# Altium footprint library Eth_Local.PcbLib: 10 footprints
Each footprint in its own frame and in the unit in brackets; x right, y up, seen from the top. Pads: shape width x height; smd on the part's side, far side on the other; paste and mask are expansions set on the pad; w line width, h text height; cw(c..) or ccw(c..) is an arc to the next point about the centre after c.
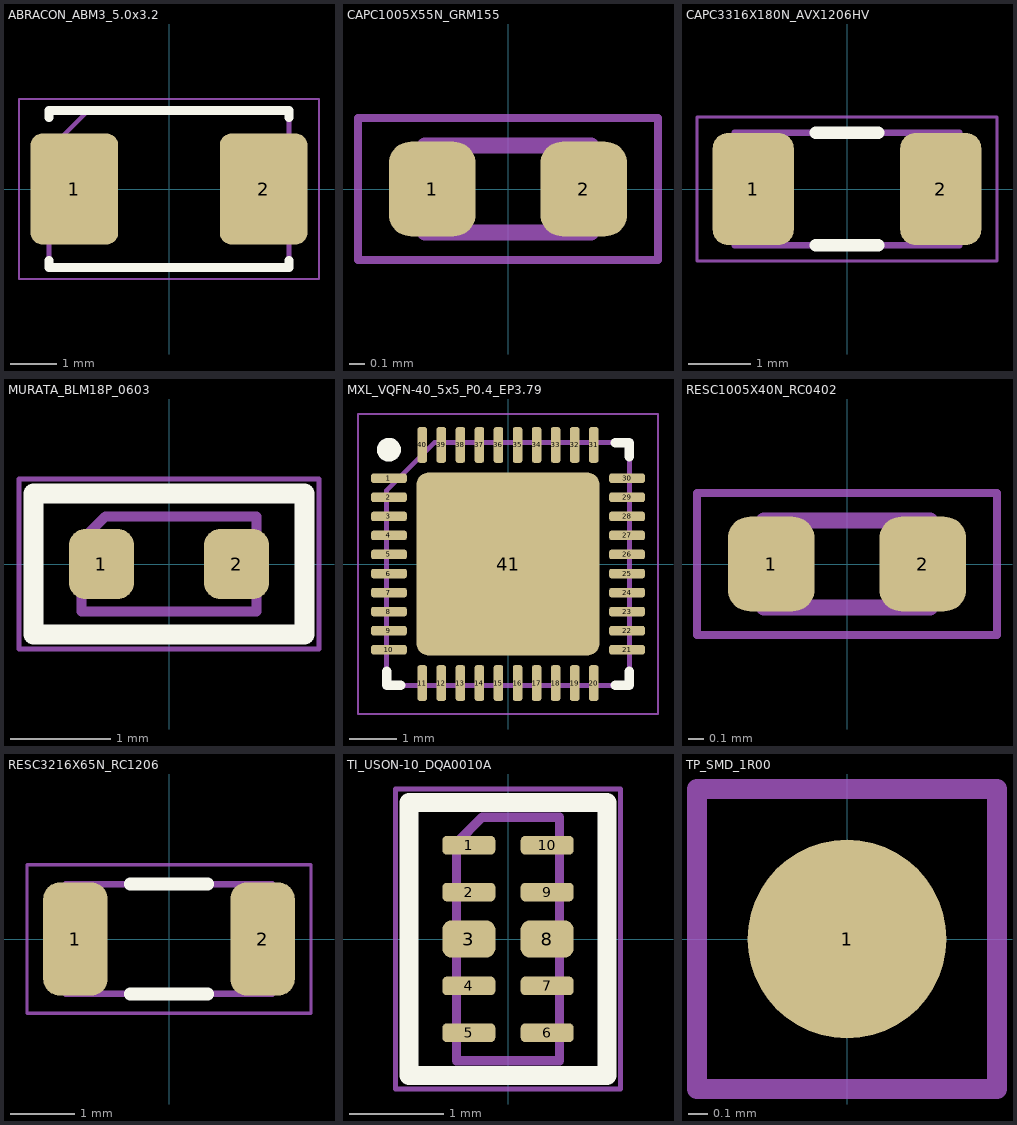
[diagram p0: the footprints below, top view; thin cyan lines are the x and y axes]

## ABRACON_ABM3_5.0x3.2 [mm] "Custom, 2 pads; custom lands, density N (nominal); from Abracon ABM3, 04-25-22, p. 3; Abracon ABM3 5.0x3.2 crystal, vendor land pattern (rev 04-25-22 p.3)"
height 1.3
pads (2):
  rrect26% 1.9x2.4 smd: 1(-2.05,0) 2(2.05,0)
Top Overlay:
  lines w0.2: -2.6,-1.55 -2.6,-1.7 2.6,-1.7 2.6,-1.55 ; -2.6,1.55 -2.6,1.7 2.6,1.7 2.6,1.55
Mechanical 13:
  lines w0.1: -2.6,-1.7 2.6,-1.7 2.6,1.7 -1.75,1.7 -2.6,0.85 -2.6,-1.7
  text ".Designator" at -2.34,-0.23 h0.46
Mechanical 15:
  lines w0.05: -3.25,-1.95 3.25,-1.95 3.25,1.95 -3.25,1.95 -3.25,-1.95

## CAPC1005X55N_GRM155 [mm] "Chip, 2 pads; IPC-7351B land pattern, density N (nominal); from Murata GRM1555C1H300JA01 data sheet, 2016/07/19, no land pattern in this datasheet; IPC-7351B, p. 1; Murata GRM155 0402 MLCC, IPC-7351B N"
height 0.55
pads (2):
  rrect50% 0.55x0.6 smd: 1(-0.48,0) 2(0.48,0)
Mechanical 13:
  lines w0.1: -0.525,-0.275 -0.525,0.275 0.525,0.275 0.525,-0.275 -0.525,-0.275
  text ".Designator" at -1.522,-0.15 h0.3
Mechanical 15:
  lines w0.05: -0.95,-0.45 -0.95,0.45 0.95,0.45 0.95,-0.45 -0.95,-0.45

## CAPC3316X180N_AVX1206HV [mm] "Chip, 2 pads; IPC-7351B land pattern, density N (nominal); from KYOCERA AVX High Voltage MLC Chips, 072022, no land pattern in this datasheet; IPC-7351B, p. 97; KYOCERA AVX 1206 high-voltage MLCC (2kV), IPC-7351B N"
height 1.8
pads (2):
  rrect38% 1.3x1.8 smd: 1(-1.5,0) 2(1.5,0)
Top Overlay:
  lines w0.2: -0.5,-0.9 0.5,-0.9 ; -0.5,0.9 0.5,0.9
Mechanical 13:
  lines w0.1: -1.8,-0.9 -1.8,0.9 1.8,0.9 1.8,-0.9 -1.8,-0.9
  text ".Designator" at -1.619,-0.159 h0.32
Mechanical 15:
  lines w0.05: -2.4,-1.15 -2.4,1.15 2.4,1.15 2.4,-1.15 -2.4,-1.15

## MURATA_BLM18P_0603 [mm] "Custom, 2 pads; custom lands, density N (nominal); from Murata BLM18 N-series reference specification JENF243A_0003AL-01, 01, p. 9; Murata BLM18P ferrite 0603, vendor reflow land (spec JENF243A p.9)"
height 0.95
pads (2):
  rrect50% 0.65x0.7 smd: 1(-0.675,0) 2(0.675,0)
Top Overlay:
  lines w0.2: -1.355,-0.705 -1.355,0.705 1.355,0.705 1.355,-0.705 -1.355,-0.705
Mechanical 13:
  lines w0.1: -0.875,-0.475 -0.875,0.238 -0.637,0.475 0.875,0.475 0.875,-0.475 -0.875,-0.475
  text ".Designator" at -1.522,-0.15 h0.3
Mechanical 15:
  lines w0.05: -1.5,-0.85 -1.5,0.85 1.5,0.85 1.5,-0.85 -1.5,-0.85

## MXL_VQFN-40_5x5_P0.4_EP3.79 [mm] "Quad flat no-lead, 41 pads, 0.4 mm pitch; IPC-7351B land pattern, density N (nominal); from MaxLinear MxL86211C Data Sheet, 1.3 (2025-05-05), 621151; no land pattern for this package (IPC-7351B from Fig.23), p. 174; MxL86211C PG-VQFN-40 5x5 0.4 pitch, EP 3.79 (DS Rev1.3 Fig.23 p.174), IPC-7351B"
height 0.9
pads (41):
  rrect50% 0.75x0.2 smd: 1(-2.5,1.8) 2(-2.5,1.4) 3(-2.5,1) 4(-2.5,0.6) 5(-2.5,0.2) 6(-2.5,-0.2) 7(-2.5,-0.6) 8(-2.5,-1) 9(-2.5,-1.4) 10(-2.5,-1.8) 21(2.5,-1.8) 22(2.5,-1.4) 23(2.5,-1) 24(2.5,-0.6) 25(2.5,-0.2) 26(2.5,0.2) 27(2.5,0.6) 28(2.5,1) 29(2.5,1.4) 30(2.5,1.8)
  rrect50% 0.2x0.75 smd: 11(-1.8,-2.5) 12(-1.4,-2.5) 13(-1,-2.5) 14(-0.6,-2.5) 15(-0.2,-2.5) 16(0.2,-2.5) 17(0.6,-2.5) 18(1,-2.5) 19(1.4,-2.5) 20(1.8,-2.5) 31(1.8,2.5) 32(1.4,2.5) 33(1,2.5) 34(0.6,2.5) 35(0.2,2.5) 36(-0.2,2.5) 37(-0.6,2.5) 38(-1,2.5) 39(-1.4,2.5) 40(-1.8,2.5)
  rrect13% 3.84x3.84 smd paste-3.84: 41(0,0)
Top Overlay:
  circle w0.25: c-2.5,2.4 r0.125
  lines w0.2: -2.55,-2.25 -2.55,-2.55 -2.25,-2.55 ; 2.25,-2.55 2.55,-2.55 2.55,-2.25 ; 2.25,2.55 2.55,2.55 2.55,2.25
Top Paste:
  region: -1.825,-1.055 -1.825,-1.825 -1.055,-1.825 -1.055,-1.055
  region: -1.825,-0.095 -1.825,-0.865 -1.055,-0.865 -1.055,-0.095
  region: -1.825,0.865 -1.825,0.095 -1.055,0.095 -1.055,0.865
  region: -1.825,1.825 -1.825,1.055 -1.055,1.055 -1.055,1.825
  region: -0.865,-1.055 -0.865,-1.825 -0.095,-1.825 -0.095,-1.055
  region: -0.865,-0.095 -0.865,-0.865 -0.095,-0.865 -0.095,-0.095
  region: -0.865,0.865 -0.865,0.095 -0.095,0.095 -0.095,0.865
  region: -0.865,1.825 -0.865,1.055 -0.095,1.055 -0.095,1.825
  region: 0.095,-1.055 0.095,-1.825 0.865,-1.825 0.865,-1.055
  region: 0.095,-0.095 0.095,-0.865 0.865,-0.865 0.865,-0.095
  region: 0.095,0.865 0.095,0.095 0.865,0.095 0.865,0.865
  region: 0.095,1.825 0.095,1.055 0.865,1.055 0.865,1.825
  region: 1.055,-1.055 1.055,-1.825 1.825,-1.825 1.825,-1.055
  region: 1.055,-0.095 1.055,-0.865 1.825,-0.865 1.825,-0.095
  region: 1.055,0.865 1.055,0.095 1.825,0.095 1.825,0.865
  region: 1.055,1.825 1.055,1.055 1.825,1.055 1.825,1.825
Mechanical 13:
  lines w0.1: -2.55,-2.55 2.55,-2.55 2.55,2.55 -1.55,2.55 -2.55,1.55 -2.55,-2.55
  text ".Designator" at -2.294,-0.226 h0.45
Mechanical 15:
  lines w0.05: -3.15,-3.15 3.15,-3.15 3.15,3.15 -3.15,3.15 -3.15,-3.15

## PCBComponent_1 [mm]

## RESC1005X40N_RC0402 [mm] "Chip, 2 pads; IPC-7351B land pattern, density N (nominal); from Yageo RC_L series, V.12 Aug 02 2022, no land pattern in this datasheet (refers to 'Chip resistors mounting'); IPC-7351B, p. 4; Yageo RC0402 chip resistor, IPC-7351B N"
height 0.4
pads (2):
  rrect50% 0.55x0.6 smd: 1(-0.48,0) 2(0.48,0)
Mechanical 13:
  lines w0.1: -0.525,-0.275 -0.525,0.275 0.525,0.275 0.525,-0.275 -0.525,-0.275
  text ".Designator" at -1.522,-0.15 h0.3
Mechanical 15:
  lines w0.05: -0.95,-0.45 -0.95,0.45 0.95,0.45 0.95,-0.45 -0.95,-0.45

## RESC3216X65N_RC1206 [mm] "Chip, 2 pads; IPC-7351B land pattern, density N (nominal); from Yageo RC_L series, V.12 Aug 02 2022, no land pattern in this datasheet (refers to 'Chip resistors mounting'); IPC-7351B, p. 4; Yageo RC1206 chip resistor, IPC-7351B N"
height 0.65
pads (2):
  rrect50% 1x1.75 smd: 1(-1.45,0) 2(1.45,0)
Top Overlay:
  lines w0.2: -0.6,-0.85 0.6,-0.85 ; -0.6,0.85 0.6,0.85
Mechanical 13:
  lines w0.1: -1.6,-0.85 -1.6,0.85 1.6,0.85 1.6,-0.85 -1.6,-0.85
  text ".Designator" at -1.522,-0.15 h0.3
Mechanical 15:
  lines w0.05: -2.2,-1.15 -2.2,1.15 2.2,1.15 2.2,-1.15 -2.2,-1.15

## TI_USON-10_DQA0010A [mm] "Custom, 10 pads; custom lands, density N (nominal); from TI SLVSBO7O TPD4E05U06, O (Aug 2024), p. 29; TPD4E05U06DQAR land pattern A (TI SLVSBO7O p.29); R0.05 land corners approximated by roundrect"
height 0.55
pads (10):
  rrect50% 0.565x0.2 smd: 1(-0.417,1) 2(-0.417,0.5) 4(-0.417,-0.5) 5(-0.417,-1) 6(0.417,-1) 7(0.417,-0.5) 9(0.417,0.5) 10(0.417,1)
  rrect50% 0.565x0.4 smd: 3(-0.417,0) 8(0.417,0)
Top Overlay:
  lines w0.2: -1.055,-1.455 -1.055,1.455 1.055,1.455 1.055,-1.455 -1.055,-1.455
Mechanical 13:
  lines w0.1: -0.55,-1.3 -0.55,1.025 -0.275,1.3 0.55,1.3 0.55,-1.3 -0.55,-1.3
  text ".Designator" at -1.522,-0.15 h0.3
Mechanical 15:
  lines w0.05: -1.2,-1.6 -1.2,1.6 1.2,1.6 1.2,-1.6 -1.2,-1.6

## TP_SMD_1R00 [mm] "Test point, 1.0 mm round SMD pad"
pads (1):
  round 1 smd: 1(0,0)
Mechanical 15:
  lines w0.102: -0.754,-0.754 0.754,-0.754 0.754,0.754 -0.754,0.754 -0.754,-0.754